# Altium footprint library Anten-Tracker.PcbLib: 36 footprints (part 1 of 3)
Each footprint in its own frame and in the unit in brackets; x right, y up, seen from the top. Pads: shape width x height; smd on the part's side, far side on the other; paste and mask are expansions set on the pad; w line width, h text height; cw(c..) or ccw(c..) is an arc to the next point about the centre after c.
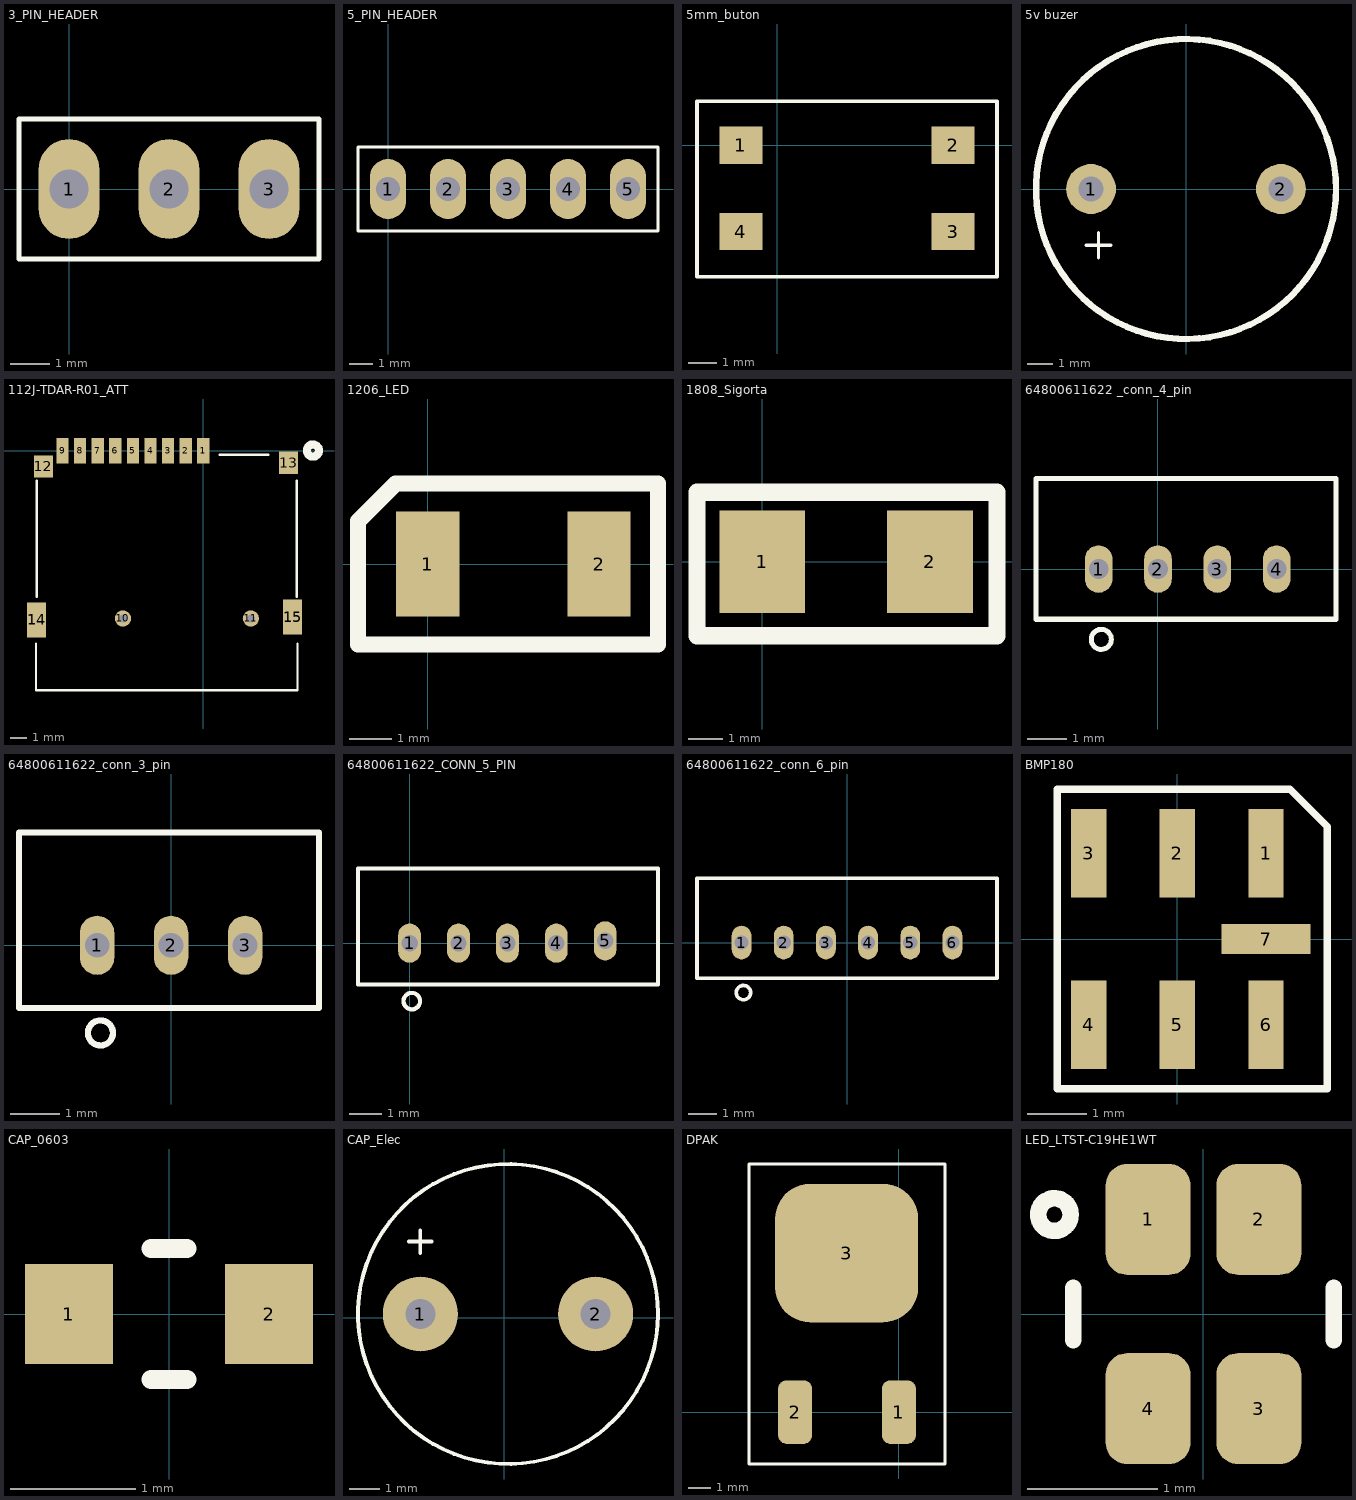
[diagram p0: the footprints below, top view; thin cyan lines are the x and y axes]

## 3_PIN_HEADER [mm]
pads (3):
  oval 1.54x2.54 hole 1 paste-1 mask+0.102: 1(0,0) 2(2.54,0) 3(5.08,0)
Top Overlay:
  lines w0.127: -1.27,-1.778 6.35,-1.778 6.35,1.778 -1.27,1.778 -1.27,-1.778
3D body "1x3 Male Pin Header.STEP": height 10.54, standoff -3, extent -1.272,-1.27 6.353,1.23

## 5_PIN_HEADER [mm]
pads (5):
  oval 1.54x2.54 hole 1 paste-1 mask+0.102: 1(0,0) 2(2.54,0) 3(5.08,0) 4(7.62,0) 5(10.16,0)
Top Overlay:
  lines w0.127: -1.27,-1.778 11.43,-1.778 11.43,1.778 -1.27,1.778 -1.27,-1.778
3D body "1x5 Male Pin Header.STEP": height 10.54, standoff -3, extent -1.27,-1.25 11.435,1.25

## 5mm_buton [mm]
pads (4):
  rect 1.5x1.3 smd paste-1 mask+0.508: 1(-1.27,0) 2(6.096,0) 3(6.096,-3) 4(-1.27,-3)
Top Overlay:
  lines w0.127: -2.794,-4.572 7.62,-4.572 7.62,1.524 -2.794,1.524 -2.794,-4.572
3D body "Tact Switch 4.5mm SMT.step": height 4.2, standoff 0, extent -1.21,-3.774 6.29,0.726

## 5v buzer [mm]
pads (2):
  round 2 hole 1 mask+0.05: 1(-3.8,0) 2(3.8,0)
Top Overlay:
  circle w0.254: c0,0 r6.005
  lines w0.127: -4,-2.25 -3,-2.25 ; -3.5,-2.75 -3.5,-1.75
3D body "Buzzer 5v.stp": height 10, standoff -5.7, extent -5.873,-6 6.124,5.998

## 112J-TDAR-R01_ATT [mil]
pads (15):
  rect 30x63 smd paste+0 mask+0: 1(0,0) 2(-43.31,0) 3(-86.61,0) 4(-129.92,0) 5(-173.23,0) 6(-216.54,0) 7(-259.84,0) 8(-303.15,0) 9(-346.46,0)
  round 40 / inner round 60 / far side round 40 hole 20 paste-20 mask-20: 10(-197.83,-413.39) 11(117.13,-413.39)
  rect 47x55 smd paste-27.5 mask+0: 12(-393.7,-39) 13(210,-30)
  rect 47.24x86.61 smd paste-43.31 mask+0: 14(-410.43,-416.96) 15(220,-410)
Top Overlay:
  circle w20: c270,0 r15
  lines w6: -411.87,-475.86 -411.87,-590 232.13,-590 232.13,-475.86 ; -410,-360 -410,-74.28 ; 40.63,-10 160,-10 ; 230,-360 230,-74.28
3D body "112J-TDAR-R01.stp": height 72.83, standoff -23.62, extent -409.53,-580.87 224.33,9.79

## 1206_LED [mm]
pads (2):
  rect 1.5x2.5 smd mask+0.05: 1(0,0) 2(4.064,0)
Top Overlay:
  lines w0.381: -1.651,-1.905 -1.651,1.016 -0.762,1.905 5.461,1.905 5.461,-1.905 -1.651,-1.905
3D body "LED_1206_Green.stp": height 0.9, standoff 0, extent 0.44,-0.8 3.71,0.85

## 1808_Sigorta [mm]
pads (2):
  rect 2.5x3 smd mask+0.05: 1(0,0) 2(4.9,0)
Top Overlay:
  lines w0.508: -1.905,-2.159 6.858,-2.159 6.858,2.032 -1.905,2.032 -1.905,-2.159
3D body "1808-2410 ?????.STEP": height 2.58, standoff 0.03, extent -0.637,-1.27 5.463,1.27

## 64800611622 _conn_4_pin [mm]
pads (4):
  oval 0.7x1.2 hole 0.5 mask+0.05: 1(-1.5,0) 2(0,0) 3(1.5,0) 4(3,0)
Top Overlay:
  circle w0.127: c-1.433,-1.778 r0.254
  lines w0.127: -3.084,-1.27 4.5,-1.27 4.5,2.286 -3.084,2.286 -3.084,-1.27
3D body "B4B-ZR.STEP": height 4.5, standoff -2.7, extent -3,-1.25 4.5,2.25

## 64800611622_conn_3_pin [mm]
pads (3):
  oval 0.7x1.2 hole 0.5 mask+0.05: 1(-1.5,0) 2(0,0) 3(1.5,0)
Top Overlay:
  circle w0.127: c-1.433,-1.778 r0.254
  lines w0.127: -3.084,-1.27 -3.084,2.286 3,2.286 3,-1.27 -3.084,-1.27
3D body "B3B-ZR.STEP": height 4.5, standoff -2.7, extent -3,-1.25 3,2.25

## 64800611622_CONN_5_PIN [mm]
pads (5):
  oval 0.7x1.2 hole 0.5 mask+0.05: 1(0,0) 2(1.5,0) 3(3,0) 4(4.5,0) 5(6,0.069)
Top Overlay:
  circle w0.127: c0.067,-1.778 r0.254
  lines w0.127: -1.584,-1.27 7.62,-1.27 7.62,2.286 -1.584,2.286 -1.584,-1.27
3D body "B5B-ZR.step": height 4.5, standoff -2.7, extent -1.5,-1.231 7.5,2.269

## 64800611622_conn_6_pin [mm]
pads (6):
  oval 0.7x1.2 hole 0.5 mask+0.05: 1(-3.75,0) 2(-2.25,0) 3(-0.75,0) 4(0.75,0) 5(2.25,0) 6(3.75,0)
Top Overlay:
  circle w0.127: c-3.683,-1.778 r0.254
  lines w0.127: -5.334,-1.27 -5.334,2.286 5.334,2.286 5.334,-1.27 -5.334,-1.27
3D body "Download_STP_64800611622_rev1.stp": height 4.75, standoff -2.45, extent -5.25,-1.242 5.25,2.258

## BMP180 [mm]
pads (7):
  rect 0.6x1.5 smd: 1(1.5,1.45) 2(0,1.45) 3(-1.5,1.45) 4(-1.5,-1.45) 5(0,-1.45) 6(1.5,-1.45)
  rect 1.5x0.5 smd: 7(1.5,0)
Top Overlay:
  lines w0.127: -2.032,-2.54 2.54,-2.54 2.54,1.905 1.905,2.54 -2.032,2.54 -2.032,-2.54
3D body "step_temp.STEP": height 1, standoff 0, extent -1.9,-1.8 1.9,1.8

## CAP_0603 [mm]
pads (2):
  rect 0.706x0.8 smd paste+0 mask+0: 1(-0.803,0) 2(0.803,0)
Top Overlay:
  lines w0.152: -0.142,-0.527 0.142,-0.527 ; -0.142,0.527 0.142,0.527
3D body "RES_1608_SAM.step": height 0.5, standoff 0, extent -0.8,-0.4 0.8,0.4

## CAP_Elec [mm]
pads (2):
  round 2.5 hole 1 paste-1 mask+0.508: 1(-2.794,0.127) 2(3.048,0.127)
Top Overlay:
  circle w0.127: c0.127,0.127 r5
  lines w0.127: -3.175,2.54 -2.797,2.54 ; -2.797,2.159 -2.797,2.54 ; -2.797,2.921 -2.797,2.54 ; -2.413,2.54 -2.797,2.54
3D body "Hybrid Capasitor.step": height 17.16, standoff -20.84, extent -5.12,-5.08 5.374,5.42

## DPAK [mm]
pads (3):
  rrect50% 1.5x2.8 smd paste-1 mask+0.508: 1(0,0) 2(-4.572,0)
  rrect50% 6.3x6.1 smd paste-1 mask+0.508: 3(-2.3,7)
Top Overlay:
  lines w0.127: -6.604,-2.286 2.032,-2.286 2.032,10.922 -6.35,10.922 -6.604,10.922 -6.604,-2.286
3D body "LD1086DT33TR.step": height 2.4, standoff 0, extent -5.55,-0.763 0.95,8.962

## LED_LTST-C19HE1WT [mm]
height 0.45
pads (4):
  rrect50% 0.65x0.85 smd: 1(-0.425,0.725) 2(0.425,0.725) 3(0.425,-0.725) 4(-0.425,-0.725)
Top Overlay:
  circle w0.127: c-1.143,0.762 r0.125
  lines w0.127: -1,-0.2 -1,0.2 ; 1,-0.2 1,0.2
3D body "step_temp.STEP": height 0.35, standoff 0, extent -0.8,-0.8 0.8,0.8